# Altium footprint library WR-SMA.PcbLib: 59 footprints (part 1 of 4)
Each footprint in its own frame and in the unit in brackets; x right, y up, seen from the top. Pads: shape width x height; smd on the part's side, far side on the other; paste and mask are expansions set on the pad; w line width, h text height; cw(c..) or ccw(c..) is an arc to the next point about the centre after c.
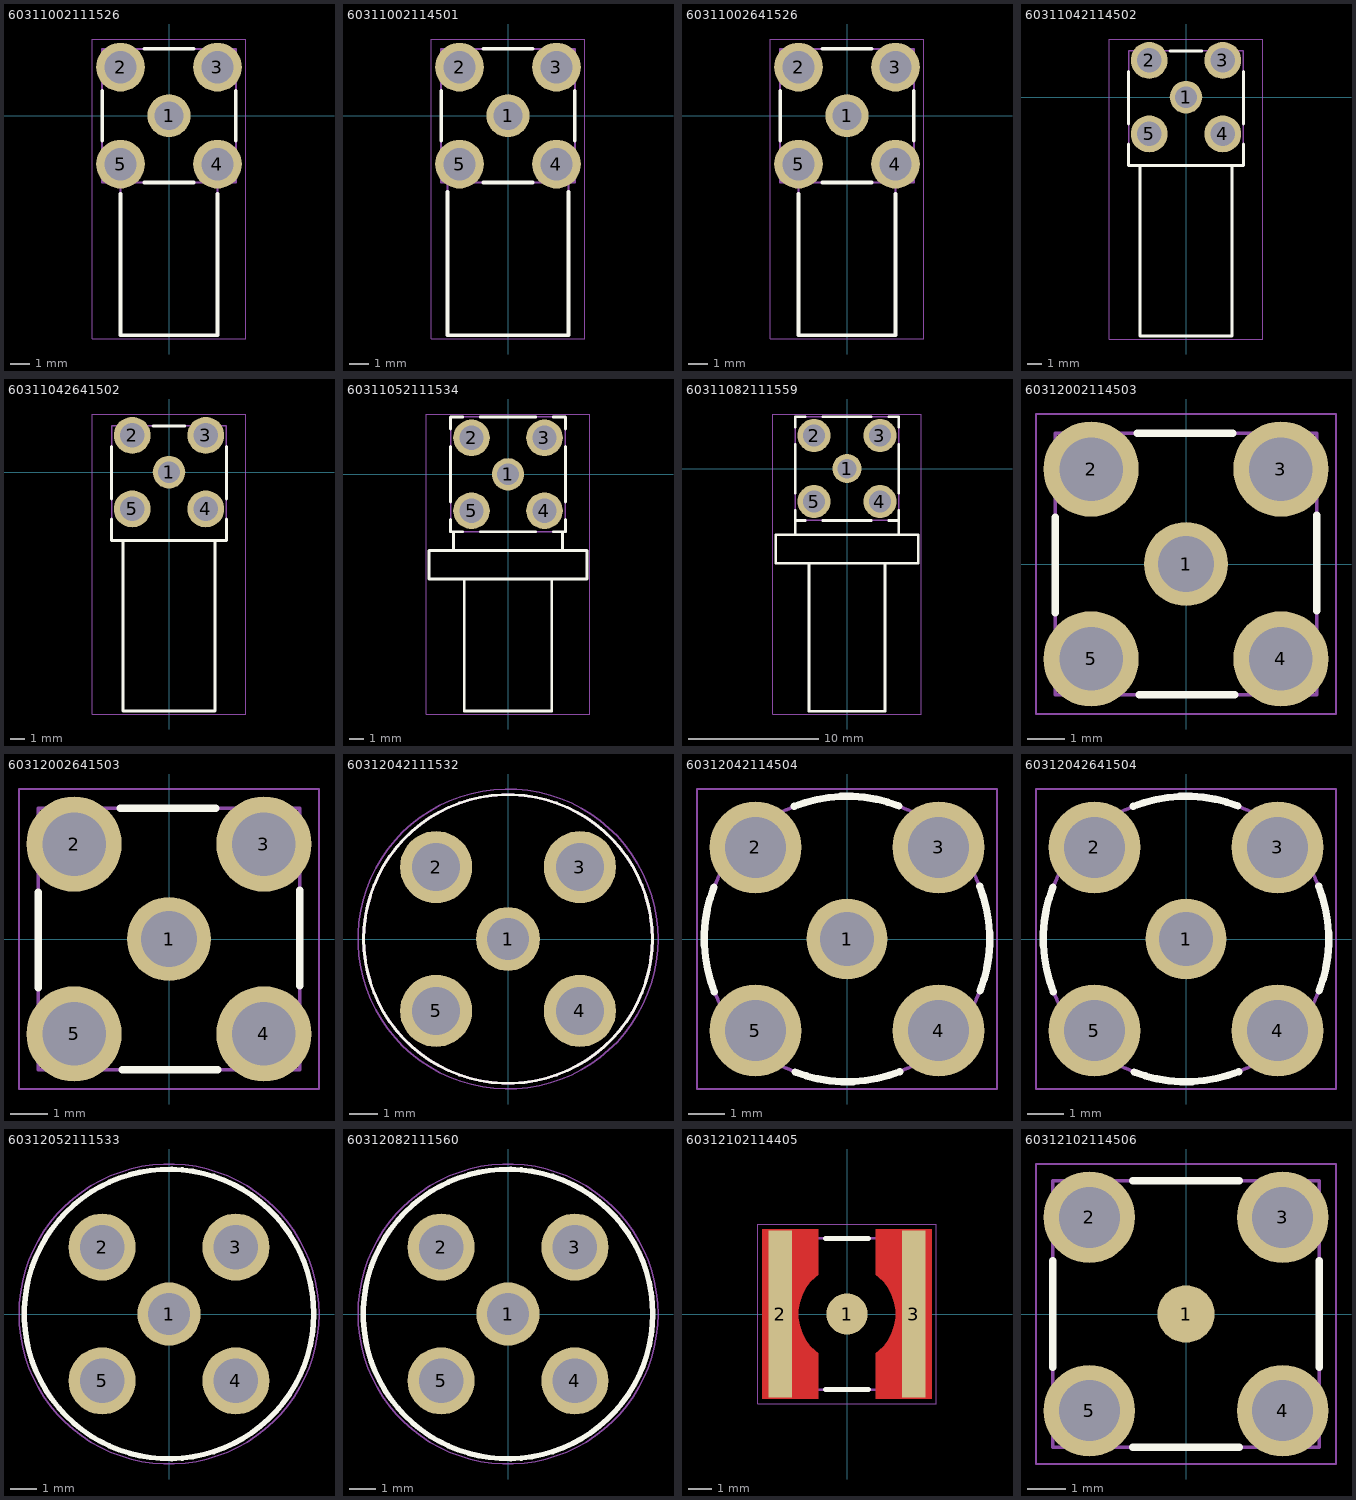
[diagram p0: the footprints below, top view; thin cyan lines are the x and y axes]

## 60311002111526 [mm] "SMA PCB THT Jack"
height 9.86
pads (5):
  round 2.25 hole 1.5: 1(0,0)
  round 2.55 hole 1.7: 2(-2.54,2.54) 3(2.54,2.54) 4(2.54,-2.54) 5(-2.54,-2.54)
Top Overlay:
  lines w0.2: -3.5,-1.3 -3.5,1.3 ; -2.54,-4.1 -2.54,-11.5 2.54,-11.5 2.54,-4.1 ; -1.3,-3.5 1.3,-3.5 ; -1.3,3.5 1.3,3.5 ; 3.5,-1.3 3.5,1.3
Top Assembly:
  lines w0.1: -2.54,-3.5 -2.54,-11.5 2.54,-11.5 2.54,-3.5 ; -3.5,-3.5 3.5,-3.5 3.5,3.5 -3.5,3.5 -3.5,-3.5
Top Designator:
  text ".Designator" at -3.647,-0.357 h1
Top Courtyard:
  lines w0.05: -4.015,-11.7 -4.015,4.015 4.015,4.015 4.015,-11.7 -4.015,-11.7
Top Component Center:
  lines w0.1: -0.5,0 0.5,0 ; 0,-0.5 0,0.5
3D body "60311002111526.stp": height 9.86, standoff -3.94, extent -3.5,-11.5 3.5,3.5

## 60311002114501 [mm] "SMA PCB THT Jack Right Angle"
height 9.66
pads (5):
  round 2.25 hole 1.5: 1(0,0)
  round 2.55 hole 1.7: 2(-2.54,2.54) 3(2.54,2.54) 4(2.54,-2.54) 5(-2.54,-2.54)
Top Overlay:
  lines w0.2: -3.5,-1.3 -3.5,1.3 ; -3.175,-4 -3.175,-11.5 3.175,-11.5 3.175,-4 ; -1.3,-3.5 1.3,-3.5 ; -1.3,3.5 1.3,3.5 ; 3.5,-1.3 3.5,1.3
Top Assembly:
  lines w0.1: -3.175,-3.5 -3.175,-11.5 3.175,-11.5 3.175,-3.5 ; -3.5,-3.5 -3.5,3.5 3.5,3.5 3.5,-3.5 -3.5,-3.5
Top Designator:
  text ".Designator" at -3.647,-0.357 h1
Top Courtyard:
  lines w0.05: -4.015,-11.7 4.015,-11.7 4.015,4.015 -4.015,4.015 -4.015,-11.7
Top Component Center:
  lines w0.1: -0.5,0 0.5,0 ; 0,-0.5 0,0.5
3D body "60311002114501.stp": height 9.66, standoff -3.94, extent -3.5,-11.502 3.5,3.5

## 60311002641526 [mm] "SMA PCB THT Jack"
height 9.86
pads (5):
  round 2.25 hole 1.5: 1(0,0)
  round 2.55 hole 1.7: 2(-2.54,2.54) 3(2.54,2.54) 4(2.54,-2.54) 5(-2.54,-2.54)
Top Overlay:
  lines w0.2: -3.5,-1.3 -3.5,1.3 ; -2.54,-4.1 -2.54,-11.5 2.54,-11.5 2.54,-4.1 ; -1.3,-3.5 1.3,-3.5 ; -1.3,3.5 1.3,3.5 ; 3.5,-1.3 3.5,1.3
Top Assembly:
  lines w0.1: -2.54,-3.5 -2.54,-11.5 2.54,-11.5 2.54,-3.5 ; -3.5,-3.5 -3.5,3.5 3.5,3.5 3.5,-3.5 -3.5,-3.5
Top Designator:
  text ".Designator" at -3.647,-0.357 h1
Top 3D Body:
  lines w0.1: -2.54,-3.5 -2.54,-11.5 2.54,-11.5 2.54,-3.5 ; -3.5,-3.5 -3.5,3.5 3.5,3.5 3.5,-3.5 -3.5,-3.5
Top Courtyard:
  lines w0.05: -4.015,-11.7 4.015,-11.7 4.015,4.015 -4.015,4.015 -4.015,-11.7
Top Component Center:
  lines w0.1: -0.5,0 0.5,0 ; 0,-0.5 0,0.5
3D body "60311002641526.stp": height 9.99, standoff -3.81, extent -3.5,-11.5 3.5,3.5

## 60311042114502 [mm] "SMA PCB THT Jack Right Angle  Rear Mount Bulkhead"
height 10.46
pads (5):
  round 2.25 hole 1.5: 1(0,0)
  round 2.55 hole 1.7: 2(-2.54,2.54) 3(2.54,2.54) 4(2.54,-2.54) 5(-2.54,-2.54)
Top Overlay:
  lines w0.2: -3.96,-3.23 -3.96,-4.73 3.96,-4.73 3.96,-3.23 ; -3.96,-1.85 -3.96,1.77 ; -3.175,-4.73 -3.175,-16.5 3.175,-16.5 3.175,-4.73 ; -1.11,3.19 1.09,3.19 ; 3.96,-1.85 3.96,1.77
Top Assembly:
  lines w0.1: -3.175,-4.73 -3.175,-16.5 3.175,-16.5 3.175,-4.73 ; -3.96,-4.73 -3.96,3.19 3.96,3.19 3.96,-4.73 -3.96,-4.73
Top Designator:
  text ".Designator" at -3.647,-0.357 h1
Top Courtyard:
  lines w0.05: -5.3,-16.7 5.3,-16.7 5.3,4.015 -5.3,4.015 -5.3,-16.7
Top Component Center:
  lines w0.1: -0.5,0 0.5,0 ; 0,-0.5 0,0.5
3D body "60311042114502.stp": height 12.16, standoff -3.94, extent -5.1,-16.5 5.1,3.19

## 60311042641502 [mm] "SMA PCB THT Jack Right Angle  Rear Mount Bulkhead"
height 10.46
pads (5):
  round 2.25 hole 1.5: 1(0,0)
  round 2.55 hole 1.7: 2(-2.54,2.54) 3(2.54,2.54) 4(2.54,-2.54) 5(-2.54,-2.54)
Top Overlay:
  lines w0.2: -3.96,-3.23 -3.96,-4.73 3.96,-4.73 3.96,-3.23 ; -3.96,-1.85 -3.96,1.77 ; -3.175,-4.73 -3.175,-16.5 3.175,-16.5 3.175,-4.73 ; -1.11,3.19 1.09,3.19 ; 3.96,-1.85 3.96,1.77
Top Assembly:
  lines w0.1: -3.175,-4.73 -3.175,-16.5 3.175,-16.5 3.175,-4.73 ; -3.96,-4.73 -3.96,3.19 3.96,3.19 3.96,-4.73 -3.96,-4.73
Top Designator:
  text ".Designator" at -3.647,-0.357 h1
Top 3D Body:
  lines w0.1: -3.175,-4.73 -3.175,-16.5 3.175,-16.5 3.175,-4.73 ; -3.96,-4.73 -3.96,3.19 3.96,3.19 3.96,-4.73 -3.96,-4.73
Top Courtyard:
  lines w0.05: -5.3,-16.7 5.3,-16.7 5.3,4.015 -5.3,4.015 -5.3,-16.7
Top Component Center:
  lines w0.1: -0.5,0 0.5,0 ; 0,-0.5 0,0.5
3D body "60311042641502.stp": height 12.25, standoff -3.85, extent -5.096,-16.5 5.096,3.19

## 60311052111534 [mm] "SMA PCB THT Right Angle Jack IP67"
height 10.44
pads (5):
  round 2.25 hole 1.5: 1(0,0)
  round 2.55 hole 1.7: 2(-2.54,2.54) 3(2.54,2.54) 4(2.54,-2.54) 5(-2.54,-2.54)
Top Overlay:
  lines w0.2: -4,-3.15 -4,-4 -3.15,-4 ; -4,-1.93 -4,1.93 ; -4,3.15 -4,4 -3.15,4 ; -3.8,-5.3 -3.8,-4 ; -3.05,-7.3 -3.05,-16.5 3.05,-16.5 3.05,-7.3 ; -1.93,-4 1.93,-4 ; -1.93,4 1.93,4 ; 3.15,-4 4,-4 4,-3.15 ; 3.15,4 4,4 4,3.15 ; 3.8,-5.3 3.8,-4 ; 4,-1.93 4,1.93 ; -5.5,-7.3 -5.5,-5.3 5.5,-5.3 5.5,-7.3 -5.5,-7.3
Top Assembly:
  lines w0.1: -3.8,-5.3 -3.8,-4 ; -3.05,-7.3 -3.05,-16.5 3.05,-16.5 3.05,-7.3 ; 3.8,-5.3 3.8,-4 ; -5.5,-7.3 -5.5,-5.3 5.5,-5.3 5.5,-7.3 -5.5,-7.3 ; -4,-4 -4,4 4,4 4,-4 -4,-4
Top Designator:
  text ".Designator" at -3.647,-0.357 h1
Top Courtyard:
  lines w0.05: -5.7,-16.7 -5.7,4.2 5.7,4.2 5.7,-16.7 -5.7,-16.7
Top Component Center:
  lines w0.1: -0.5,0 0.5,0 ; 0,-0.5 0,0.5
3D body "60311052111534.stp": height 11.88, standoff -3.91, extent -5.5,-16.5 5.5,4

## 60311082111559 [mm] "SMA R/A Bulkhead PCB Jack"
height 10.44
pads (5):
  round 2.25 hole 1.5: 1(0,0)
  round 2.55 hole 1.7: 2(-2.54,2.54) 3(2.54,2.54) 4(2.54,-2.54) 5(-2.54,-2.54)
Top Overlay:
  lines w0.2: -4,-5.1 -4,-3.2 ; -4,-4 -3.2,-4 ; -4,-1.88 -4,1.88 ; -4,3.2 -4,4 -3.2,4 ; -2.925,-7.3 -2.925,-18.7 2.925,-18.7 2.925,-7.3 ; -1.88,-4 1.88,-4 ; -1.88,4 1.88,4 ; 3.2,-4 4,-4 ; 3.2,4 4,4 4,3.2 ; 4,-5.1 4,-3.2 ; 4,-1.88 4,1.88 ; -5.5,-7.3 5.5,-7.3 5.5,-5.1 -5.5,-5.1 -5.5,-7.3
Top Assembly:
  lines w0.1: -4,-5.1 -4,4 4,4 4,-5.1 ; -4,-4 4,-4 ; -2.925,-7.3 -2.925,-18.7 2.925,-18.7 2.925,-7.3 ; -5.5,-7.3 5.5,-7.3 5.5,-5.1 -5.5,-5.1 -5.5,-7.3
Top Designator:
  text ".Designator" at -3.647,-0.357 h1
Top 3D Body:
  lines w0.1: -4,-5.1 -4,4 4,4 4,-5.1 ; -4,-4 4,-4 ; -2.925,-7.3 -2.925,-18.7 2.925,-18.7 2.925,-7.3 ; -5.5,-7.3 5.5,-7.3 5.5,-5.1 -5.5,-5.1 -5.5,-7.3
Top Courtyard:
  lines w0.05: -5.7,-18.9 -5.7,4.2 5.7,4.2 5.7,-18.9 -5.7,-18.9
Top Component Center:
  lines w0.1: -0.5,0 0.5,0 ; 0,-0.5 0,0.5
3D body "60311082111559.stp": height 11.9, standoff -3.89, extent -5.5,-18.7 5.5,4

## 60312002114503 [mm] "SMA PCB THT Jack Straight"
height 9.56
pads (5):
  round 2.25 hole 1.5: 1(0,0)
  round 2.55 hole 1.7: 2(-2.54,2.54) 3(2.54,2.54) 4(2.54,-2.54) 5(-2.54,-2.54)
Top Overlay:
  lines w0.2: -3.5,-1.3 -3.5,1.25 ; -1.3,3.5 1.25,3.5 ; -1.25,-3.5 1.3,-3.5 ; 3.5,-1.25 3.5,1.3
Top Assembly:
  lines w0.1: -3.5,-3.5 3.5,-3.5 3.5,3.5 -3.5,3.5 -3.5,-3.5
Top Designator:
  text ".Designator" at -3.647,-0.357 h1
Top Courtyard:
  lines w0.05: -4.015,-4.015 -4.015,4.015 4.015,4.015 4.015,-4.015 -4.015,-4.015
Top Component Center:
  lines w0.1: -0.5,0 0.5,0 ; 0,-0.5 0,0.5
3D body "60312002114503.stp": height 9.56, standoff -3.94, extent -3.5,-3.5 3.5,3.5

## 60312002641503 [mm] "SMA PCB THT Jack Straight"
height 9.56
pads (5):
  round 2.25 hole 1.5: 1(0,0)
  round 2.55 hole 1.7: 2(-2.54,2.54) 3(2.54,2.54) 4(2.54,-2.54) 5(-2.54,-2.54)
Top Overlay:
  lines w0.2: -3.5,-1.3 -3.5,1.25 ; -1.3,3.5 1.25,3.5 ; -1.25,-3.5 1.3,-3.5 ; 3.5,-1.25 3.5,1.3
Top Assembly:
  lines w0.1: -3.5,-3.5 3.5,-3.5 3.5,3.5 -3.5,3.5 -3.5,-3.5
Top Designator:
  text ".Designator" at -3.647,-0.357 h1
Top 3D Body:
  lines w0.1: -3.5,-3.5 3.5,-3.5 3.5,3.5 -3.5,3.5 -3.5,-3.5
Top Courtyard:
  lines w0.05: -4.015,-4.015 -4.015,4.015 4.015,4.015 4.015,-4.015 -4.015,-4.015
Top Component Center:
  lines w0.1: -0.5,0 0.5,0 ; 0,-0.5 0,0.5
3D body "60312002641503.stp": height 9.6, standoff -3.9, extent -3.5,-3.5 3.5,3.5

## 60312042111532 [mm] "SMA PCB THT Jack"
height 12.65
pads (5):
  round 2.25 hole 1.5: 1(0,0)
  round 2.55 hole 1.7: 2(-2.54,2.54) 3(2.54,2.54) 4(2.54,-2.54) 5(-2.54,-2.54)
Top Overlay:
  circle w0.1: c0,0 r5.1
Top Assembly:
  circle w0.1: c0,0 r5.1
Top Designator:
  text ".Designator" at -3.647,-0.357 h1
Top Courtyard:
  circle w0.05: c0,0 r5.3
Top Component Center:
  lines w0.1: -0.5,0 0.5,0 ; 0,-0.5 0,0.5
3D body "60312042111532.stp": height 12.64, standoff -3.95, extent -7.212,-7.212 7.212,7.212

## 60312042114504 [mm] "SMA PCB THT Jack Straight Rear  Mount Bulkhead"
height 20.83
pads (5):
  round 2.25 hole 1.5: 1(0,0)
  round 2.55 hole 1.7: 2(-2.54,2.54) 3(2.54,2.54) 4(2.54,-2.54) 5(-2.54,-2.54)
Top Overlay:
  lines w0.2: -3.687,1.445 ccw(c0,0) -3.68,-1.462 ; -1.462,3.68 cw(c0,0) 1.445,3.687 ; -1.445,-3.687 ccw(c0,0) 1.462,-3.68 ; 3.68,1.462 cw(c0,0) 3.687,-1.445
Top Assembly:
  circle w0.1: c0,0 r3.96
Top Designator:
  text ".Designator" at -3.647,-0.357 h1
Top Courtyard:
  lines w0.05: -4.16,-4.16 4.16,-4.16 4.16,4.16 -4.16,4.16 -4.16,-4.16
Top Component Center:
  lines w0.1: -0.5,0 0.5,0 ; 0,-0.5 0,0.5
3D body "60312042114504(1).step": height 20.9, standoff -3.87, extent -5.6,-5.6 5.601,5.601

## 60312042641504 [mm] "SMA PCB THT Jack Straight Rear  Mount Bulkhead"
height 20.83
pads (5):
  round 2.25 hole 1.5: 1(0,0)
  round 2.55 hole 1.7: 2(-2.54,2.54) 3(2.54,2.54) 4(2.54,-2.54) 5(-2.54,-2.54)
Top Overlay:
  lines w0.2: -3.687,1.445 ccw(c0,0) -3.68,-1.462 ; -1.462,3.68 cw(c0,0) 1.445,3.687 ; -1.445,-3.687 ccw(c0,0) 1.462,-3.68 ; 3.68,1.462 cw(c0,0) 3.687,-1.445
Top Assembly:
  circle w0.1: c0,0 r3.96
Top Designator:
  text ".Designator" at -3.647,-0.357 h1
Top 3D Body:
  circle w0.1: c0,0 r3.96
Top Courtyard:
  lines w0.05: -4.16,-4.16 4.16,-4.16 4.16,4.16 -4.16,4.16 -4.16,-4.16
Top Component Center:
  lines w0.1: -0.5,0 0.5,0 ; 0,-0.5 0,0.5
3D body "60312042641504.stp": height 20.87, standoff -3.9, extent -7.201,-7.201 7.21,7.21

## 60312052111533 [mm] "SMA PCB THT Straight Jack IP67"
height 17.4
pads (5):
  round 2.4 hole 1.6: 1(0,0)
  round 2.55 hole 1.7: 2(-2.54,2.54) 3(2.54,2.54) 4(2.54,-2.54) 5(-2.54,-2.54)
Top Overlay:
  circle w0.2: c0,0 r5.5
Top Assembly:
  circle w0.1: c0,0 r5.5
Top Designator:
  text ".Designator" at -3.647,-0.357 h1
Top Courtyard:
  circle w0.05: c0,0 r5.7
Top Component Center:
  lines w0.1: -0.5,0 0.5,0 ; 0,-0.5 0,0.5
3D body "60312052111533.stp": height 17.44, standoff -3.9, extent -7.778,-7.778 7.778,7.778

## 60312082111560 [mm] "SMA Bulkhead PCB Jack"
height 17.4
pads (5):
  round 2.4 hole 1.6: 1(0,0)
  round 2.55 hole 1.7: 2(-2.54,2.54) 3(2.54,2.54) 4(2.54,-2.54) 5(-2.54,-2.54)
Top Overlay:
  circle w0.2: c0,0 r5.5
Top Assembly:
  circle w0.1: c0,0 r5.5
Top Designator:
  text ".Designator" at -3.647,-0.357 h1
Top 3D Body:
  circle w0.1: c0,0 r5.5
Top Courtyard:
  circle w0.05: c0,0 r5.7
Top Component Center:
  lines w0.1: -0.5,0 0.5,0 ; 0,-0.5 0,0.5
3D body "60312082111560.stp": height 17.49, standoff -3.85, extent -7.776,-7.767 7.767,7.776

## 60312102114405 [mm] "SMA PCB SMT Jack Straight"
height 8.84
pads (3):
  round 1.73 smd: 1(0,0)
  rect 1x7 smd: 2(-2.8,0) 3(2.8,0)
Top Layer:
  region: -3.555,-3.56 -1.205,-3.56 -1.205,-1.652 -1.331,-1.553 -1.557,-1.326 -1.745,-1.067 -1.89,-0.781 -1.989,-0.477 -2.039,-0.16 -2.039,0.16 -1.989,0.477 -1.89,0.781 -1.745,1.067 -1.557,1.326 -1.331,1.553 -1.205,1.652 -1.205,3.56 -3.555,3.56
  region: 3.555,-3.56 1.205,-3.56 1.205,-1.652 1.331,-1.553 1.557,-1.326 1.745,-1.067 1.89,-0.781 1.989,-0.477 2.039,-0.16 2.039,0.16 1.989,0.477 1.89,0.781 1.745,1.067 1.557,1.326 1.331,1.553 1.205,1.652 1.205,3.56 3.555,3.56
Top Overlay:
  lines w0.2: -0.9,-3.175 0.9,-3.175 ; -0.9,3.175 0.9,3.175
Top Assembly:
  lines w0.1: -3.175,-3.175 -3.175,3.175 3.175,3.175 3.175,-3.175 -3.175,-3.175
Top Designator:
  text ".Designator" at -3.647,-0.357 h1
Top Courtyard:
  lines w0.05: -3.755,-3.76 -3.755,3.76 3.755,3.76 3.755,-3.76 -3.755,-3.76
Top Component Center:
  lines w0.1: -0.5,0 0.5,0 ; 0,-0.5 0,0.5
3D body "60312102114405.stp": height 8.84, standoff 0, extent -3.175,-3.175 3.175,3.175

## 60312102114506 [mm] "SMA PCB SMT Jack Straight with  THT Grounding Pins"
height 9.56
pads (5):
  round 1.5 smd: 1(0,0)
  round 2.4 hole 1.6: 2(-2.54,2.54) 3(2.54,2.54) 4(2.54,-2.54) 5(-2.54,-2.54)
Top Overlay:
  lines w0.2: -3.5,-1.4 -3.5,1.4 ; -1.4,-3.5 1.4,-3.5 ; -1.4,3.5 1.4,3.5 ; 3.5,-1.4 3.5,1.4
Top Assembly:
  lines w0.1: -3.5,-3.5 3.5,-3.5 3.5,3.5 -3.5,3.5 -3.5,-3.5
Top Designator:
  text ".Designator" at -3.647,-0.357 h1
Top Courtyard:
  lines w0.05: -3.94,-3.94 -3.94,3.94 3.94,3.94 3.94,-3.94 -3.94,-3.94
Top Component Center:
  lines w0.1: -0.5,0 0.5,0 ; 0,-0.5 0,0.5
3D body "60312102114506.stp": height 9.56, standoff -3.94, extent -3.5,-3.5 3.5,3.5